# Altium footprint library SKSLLAE010.PcbLib: 1 footprints
Each footprint in its own frame and in the unit in brackets; x right, y up, seen from the top. Pads: shape width x height; smd on the part's side, far side on the other; paste and mask are expansions set on the pad; w line width, h text height; cw(c..) or ccw(c..) is an arc to the next point about the centre after c.
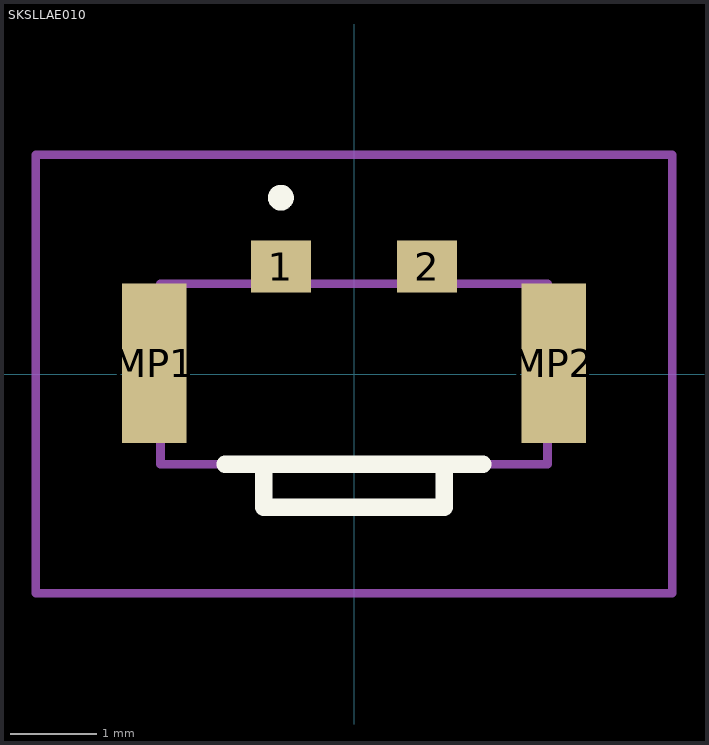
[diagram p0: the footprint, top view; thin cyan lines are the x and y axes]

## SKSLLAE010 [mm]
pads (4):
  rect 0.7x0.6 smd: 1(-0.85,1.25) 2(0.85,1.25)
  rect 0.75x1.85 smd: MP1(-2.325,0.125) MP2(2.325,0.125)
Top Overlay:
  lines w0.2: -1.5,-1.05 -1,-1.05 ; -1.5,-1.05 -1,-1.05 ; -1.5,-1.05 -1.5,-1.05 ; -1,-1.05 -1,-1.05 ; -0.85,2 -0.85,2 ; -0.85,2 ccw(c-0.85,2.05) -0.85,2.1 ; -0.85,2 cw(c-0.85,2.05) -0.85,2.1 ; -0.85,2 -0.85,2 ; -0.85,2 ccw(c-0.85,2.05) -0.85,2.1 ; -0.85,2.1 -0.85,2.1 ; 1.05,-1.05 -1.05,-1.05 -1.05,-1.55 1.05,-1.55 1.05,-1.05 ; 1.05,-1.05 1.5,-1.05 ; 1.05,-1.05 1.05,-1.05 ; 1.05,-1.05 1.5,-1.05 ; 1.5,-1.05 1.5,-1.05
Mechanical 15:
  lines w0.1: -2.25,-1.05 2.25,-1.05 2.25,1.05 -2.25,1.05 -2.25,-1.05 ; -1.05,-1.55 1.05,-1.55 1.05,-1.05 -1.05,-1.05 -1.05,-1.55
Mechanical 20:
  lines w0.1: -3.7,-2.55 3.7,-2.55 3.7,2.55 -3.7,2.55 -3.7,-2.55